# EAGLE library part 6101XX249121_610120249121 (library WR-PHD)
WR-PHD 2.54 mm SMT Pin Header Double Row Right Angled ARTICLE PROPERTIES: Pins:6;​ 8;​ 10;​ 12;​ 14;​ 16;​ 20;​ 22;​ 24;​ 26 KIND PROPERTIES: Pitch：2.54 mm Rows：Dual Gender：Pin Header Type：Angled MATERIAL PROPERTIES: Insulator Material PA9T Insulator Flammability Rating:UL94 V-0 Contact Material:Copper Alloy Contact Plating:Gold Contact Type:Stamped GENERAL INFORMATION Operating Temperature:-40 up to +105 °C ELECTRICAL PROPERTIES: Withstanding Voltage 600 V (AC) Contact Resistance 20 mΩ RISO 1000 MΩ CERTIFICATION UL Approval E323964 PACKAGING PROPERTIES Packaging:Tape and Reel <https://www.we-online.com/catalog/media/o33203v209%20Family_WR-PHD_6101_xx249121.jpg> Details see: https://www.we-online.com/catalog/en/PHD_2_54_SMT_DOUBLE_ROW_RIGHT_ANGLED_PIN_HEADER_6101XX249121 Updated by Ella Wu 2021-12-08 2021 (C) Würth Elektronik
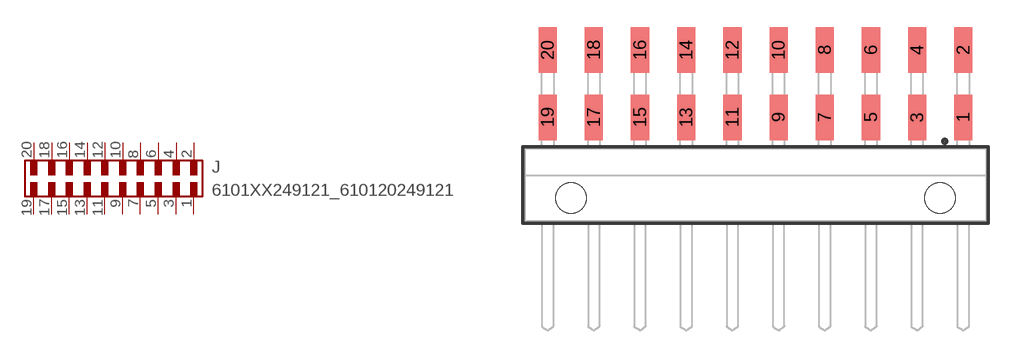
[diagram p151: symbol with the pads of 610120249121; footprint 610120249121]

Designator prefix J

## 6101XX249121_610120249121 (DATASHEET-URL: https://www.we-online.com/redexpert/spec/610120249121?ae; GENDER: Pin Header; IR: 3A; MOUNT: SMT; PACKAGING: Tape and Reel; PART-NUMBER: 610120249121; PINS: 20; PITCH: 2.54 mm; ROWS: Dual; TYPE: Angled; VALUE: 610120249121)  [610120249121]
1  1  pas
2  2  pas
3  3  pas
4  4  pas
5  5  pas
6  6  pas
7  7  pas
8  8  pas
9  9  pas
10  10  pas
11  11  pas
12  12  pas
13  13  pas
14  14  pas
15  15  pas
16  16  pas
17  17  pas
18  18  pas
19  19  pas
20  20  pas

## Footprint 610120249121 (pad centres in mm)
WR-PHD SMT Pin Header Double Row Right Angled,20Pins
smd 1 x 2.5: 1 11.43,4.45; 2 11.43,8.15; 3 8.89,4.45; 4 8.89,8.15; 5 6.35,4.45; 6 6.35,8.15; 7 3.81,4.45; 8 3.81,8.15; 9 1.27,4.45; 10 1.27,8.15; 11 -1.27,4.45; 12 -1.27,8.15; 13 -3.81,4.45; 14 -3.81,8.15; 15 -6.35,4.45; 16 -6.35,8.15; 17 -8.89,4.45; 18 -8.89,8.15; 19 -11.43,4.45; 20 -11.43,8.15
hole 1.68 at 10.16,0
hole 1.68 at -10.16,0